# EAGLE library part IC_LT1933 (library dp_devices.v6)
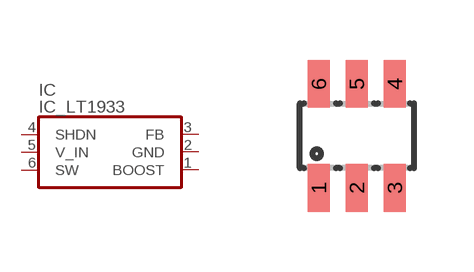
[diagram p169: symbol with the pads of SOT-23-6; footprint SOT-23-6]

Designator prefix IC

## IC_LT1933  [SOT-23-6]
1  BOOST  pas
2  GND  sup
3  FB  pas
4  SHDN  pas
5  V_IN  pwr
6  SW  pas

## Footprint SOT-23-6 (pad centres in mm)
smd 0.55 x 1.2: 1 -0.95,-1.3; 2 0,-1.3; 3 0.95,-1.3; 4 0.95,1.3; 5 0,1.3; 6 -0.95,1.3